# Altium footprint library CH340E.PcbLib: 1 footprints
Each footprint in its own frame and in the unit in brackets; x right, y up, seen from the top. Pads: shape width x height; smd on the part's side, far side on the other; paste and mask are expansions set on the pad; w line width, h text height; cw(c..) or ccw(c..) is an arc to the next point about the centre after c.
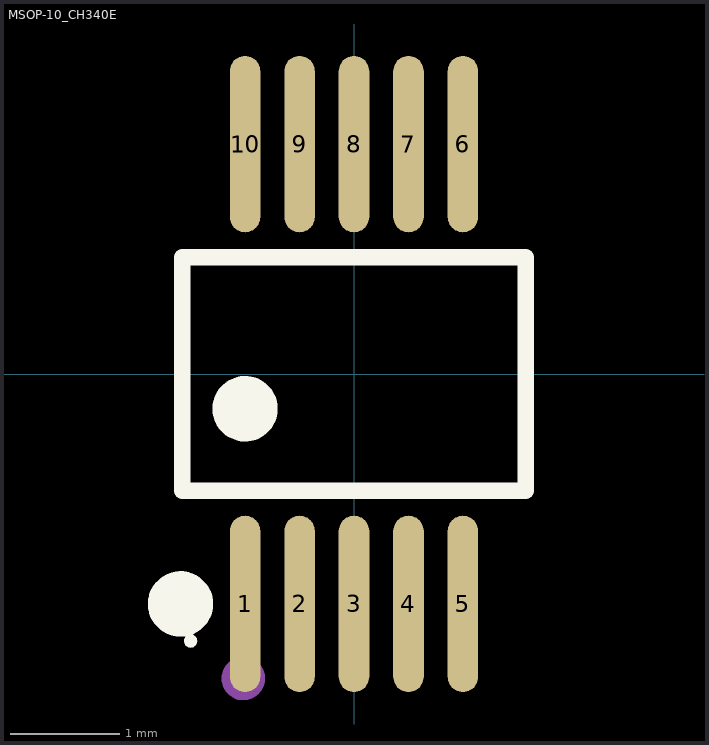
[diagram p0: the footprint, top view; thin cyan lines are the x and y axes]

## MSOP-10_CH340E [mm] "USB转串口芯片CH340 应用功能:收发器 USB协议版本:USB 2.0 数据速率:2Mbps 型号:CH340E LCSC C99652 厂牌:WCH(南京沁恒)"
height 1
pads (10):
  rrect100% 0.28x1.62 smd mask+0.05: 1(-1,-2.11) 2(-0.5,-2.11) 3(0,-2.11) 4(0.5,-2.11) 5(1,-2.11) 6(1,2.11) 7(0.5,2.11) 8(0,2.11) 9(-0.5,2.11) 10(-1,2.11)
Top Overlay:
  circle w0.3: c-1,-0.319 r0.15
  circle w0.3: c-1.592,-2.11 r0.15
  region: -1.44,-2.45 -1.441,-2.438 -1.444,-2.427 -1.45,-2.417 -1.457,-2.408 -1.467,-2.4 -1.477,-2.395 -1.488,-2.391 -1.5,-2.39 -1.512,-2.391 -1.523,-2.395 -1.533,-2.4 -1.542,-2.408 -1.55,-2.417 -1.555,-2.427 -1.559,-2.438 -1.56,-2.45 -1.559,-2.462 -1.555,-2.473 -1.55,-2.483 -1.542,-2.492 -1.533,-2.5 -1.523,-2.505 -1.512,-2.509 -1.5,-2.51 -1.488,-2.509 -1.477,-2.505 -1.467,-2.5 -1.457,-2.492 -1.45,-2.483 -1.444,-2.473 -1.441,-2.462
  lines w0.152: -1.576,-1.071 -1.576,1.071 1.576,1.071 1.576,-1.071 -1.576,-1.071
Mechanical 2:
  circle w0.2: c-1.016,-2.794 r0.1
3D body "MSOP-10_L3.0-W3.0-P0.50-LS5.0-BL.step": height 1, standoff 0, extent -1.842,-3.02 1.676,3.02